# Altium footprint library SamacSys.PcbLib: 1008 footprints (part 33 of 63)
Each footprint in its own frame and in the unit in brackets; x right, y up, seen from the top. Pads: shape width x height; smd on the part's side, far side on the other; paste and mask are expansions set on the pad; w line width, h text height; cw(c..) or ccw(c..) is an arc to the next point about the centre after c.
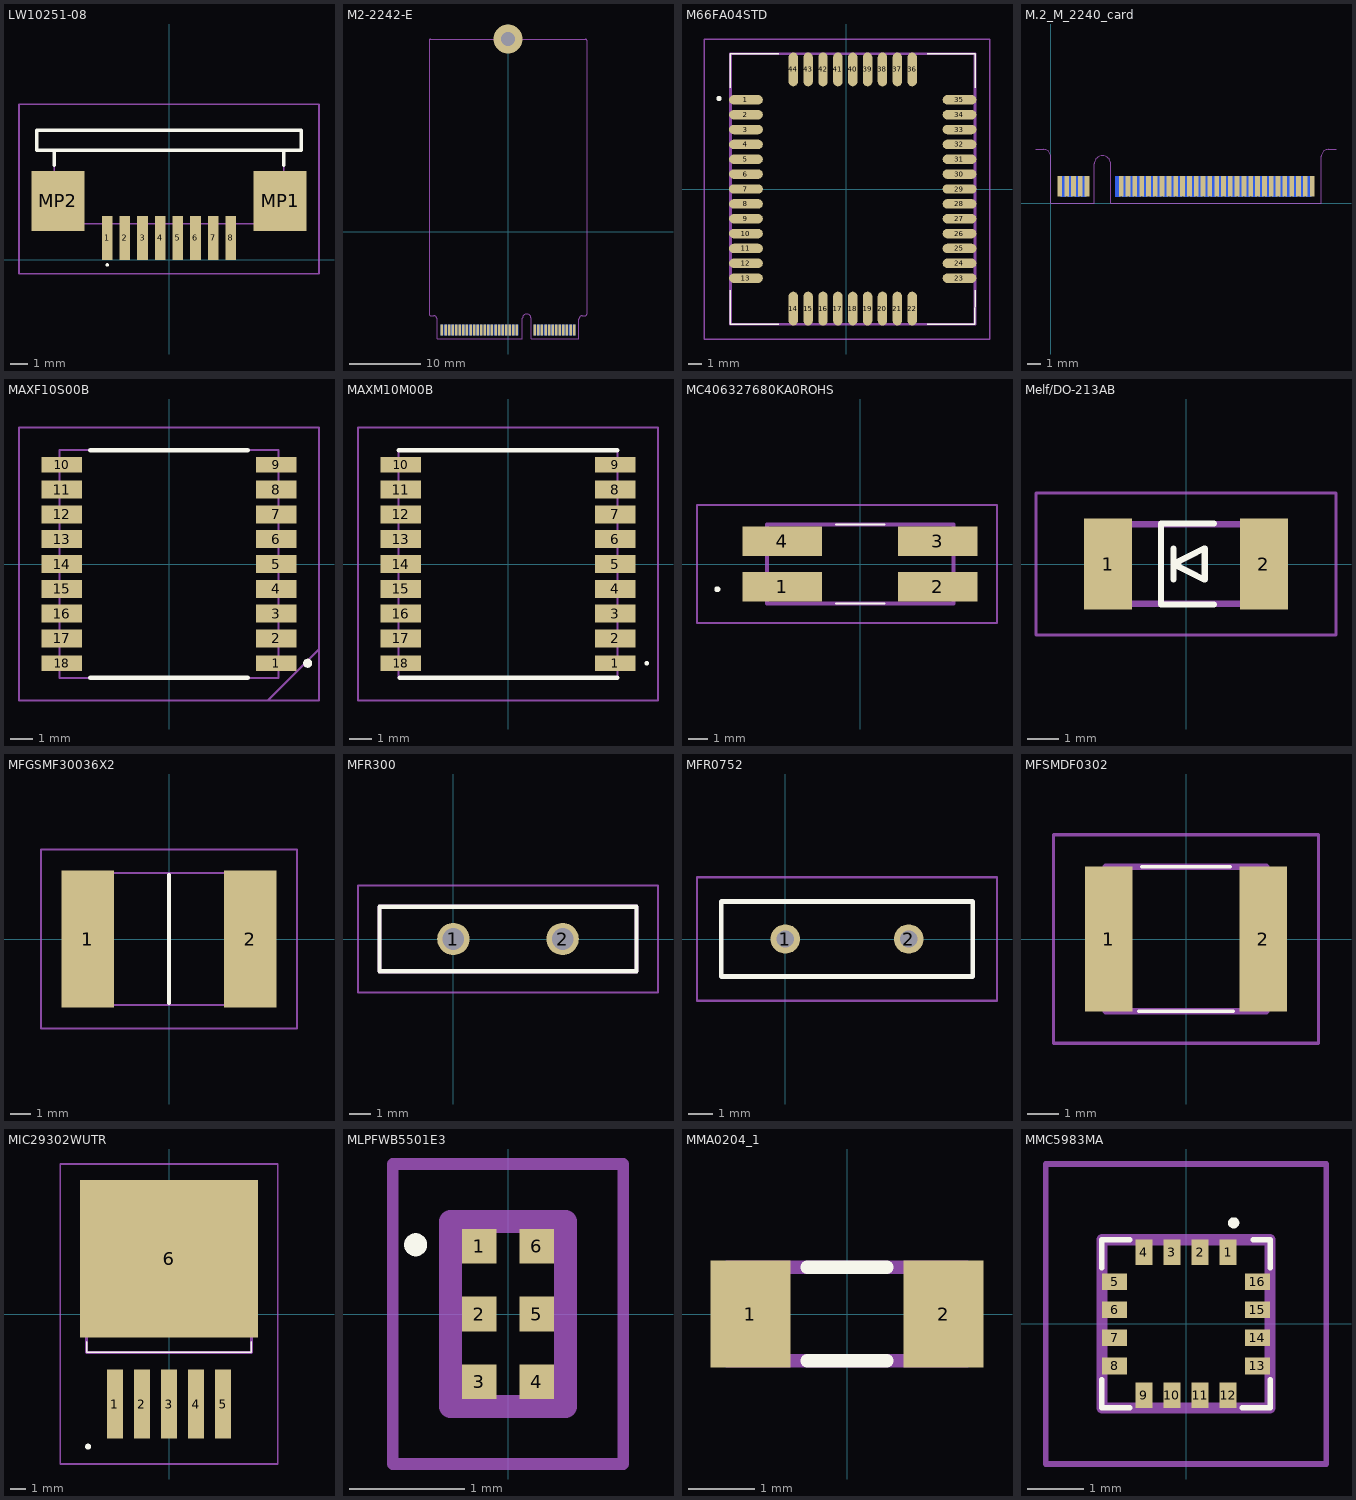
[diagram p32: the footprints below, top view; thin cyan lines are the x and y axes]

## LW10251-08 [mm] "FFC 1mm 8pin"
pads (10):
  rect 0.6x2.5 smd: 1(-3.5,1.25) 2(-2.5,1.25) 3(-1.5,1.25) 4(-0.5,1.25) 5(0.5,1.25) 6(1.5,1.25) 7(2.5,1.25) 8(3.5,1.25)
  rect 3x3.4 smd: MP1(6.3,3.35) MP2(-6.3,3.35)
Top Overlay:
  lines w0.1: -3.5,-0.328 ccw(c-3.5,-0.278) -3.5,-0.228 ccw(c-3.5,-0.278) -3.5,-0.328
  lines w0.2: -7.5,7.322 -7.5,6.222 -6.5,6.222 ; -7.5,7.35 3.5,7.35 ; -6.5,5.362 -6.5,6.222 ; -3.5,7.35 7.5,7.35 ; -2.5,6.222 6.5,6.222 ; 2.5,6.222 -6.5,6.222 ; 6.5,5.362 6.5,6.222 ; 7.5,7.322 7.5,6.222 6.5,6.222
Assembly:
  lines w0.1: -6.5,6.222 -6.5,2.05 2.5,2.05 ; -3.5,6.222 7.5,6.222 7.5,7.322 -3.5,7.322 ; -2.5,2.05 6.5,2.05 6.5,6.222 ; 3.5,6.222 -7.5,6.222 -7.5,7.322 3.5,7.322
Countryard:
  lines w0.1: -4.5,-0.778 8.5,-0.778 8.5,8.822 -4.5,8.822 ; 4.5,-0.778 -8.5,-0.778 -8.5,8.822 4.5,8.822
3D body "68610414422.stp": height 3.01, standoff 0, extent -7.5,0.472 3.5,7.572
3D body "68610414422.stp": height 3.01, standoff 0, extent -3.5,0.472 7.5,7.572

## M2-2242-E [mm] "UNTESTED"
pads (71):
  rect 0.35x1.5 smd: 1(9.25,-13.75) 3(8.75,-13.75) 5(8.25,-13.75) 7(7.75,-13.75) 9(7.25,-13.75) 11(6.75,-13.75) 13(6.25,-13.75) 15(5.75,-13.75) 17(5.25,-13.75) 19(4.75,-13.75) 21(4.25,-13.75) 23(3.75,-13.75) 25(1.25,-13.75) 25(1.25,-13.75) 25(1.25,-13.75) 27(0.75,-13.75) 29(0.25,-13.75) 31(-0.25,-13.75) 33(-0.75,-13.75) 35(-1.25,-13.75) 37(-1.75,-13.75) 39(-2.25,-13.75) 41(-2.75,-13.75) 43(-3.25,-13.75) 45(-3.75,-13.75) 47(-4.25,-13.75) 49(-4.75,-13.75) 51(-5.25,-13.75) 53(-5.75,-13.75) 55(-6.25,-13.75) 57(-6.75,-13.75) 59(-7.25,-13.75) 61(-7.75,-13.75) 63(-8.25,-13.75) 65(-8.75,-13.75) 67(-9.25,-13.75)
  rect 0.35x1.5 smd far side: 2(9.25,-13.75) 4(8.75,-13.75) 6(8.25,-13.75) 8(7.75,-13.75) 10(7.25,-13.75) 12(6.75,-13.75) 14(6.25,-13.75) 16(5.75,-13.75) 18(5.25,-13.75) 20(4.75,-13.75) 22(4.25,-13.75) 24(3.75,-13.75) 26(1.25,-13.75) 26(1.25,-13.75) 28(0.75,-13.75) 30(0.25,-13.75) 32(-0.25,-13.75) 34(-0.75,-13.75) 36(-1.25,-13.75) 38(-1.75,-13.75) 40(-2.25,-13.75) 42(-2.75,-13.75) 44(-3.25,-13.75) 46(-3.75,-13.75) 48(-4.25,-13.75) 50(-4.75,-13.75) 52(-5.25,-13.75) 54(-5.75,-13.75) 56(-6.25,-13.75) 58(-6.75,-13.75) 60(-7.25,-13.75) 62(-7.75,-13.75) 64(-8.25,-13.75) 66(-8.75,-13.75) 68(-9.25,-13.75)
via 0,27 diameter 4 hole 2
Top Solder:
  region: 2.025,-15 -9.925,-15 -9.925,-14.7 2.025,-14.7
  region: 9.925,-15 3.225,-15 3.225,-14.7 9.925,-14.7
Bottom Solder:
  region: 2.025,-15 -9.925,-15 -9.925,-14.7 2.025,-14.7
  region: 9.925,-15 3.225,-15 3.225,-14.7 9.925,-14.7
3D Body:
  lines w0.1: -11,-11.55 ccw(c-10.8,-11.55) -10.8,-11.75 -10.425,-11.75 cw(c-10.425,-12.25) -9.925,-12.25 -9.925,-15 2.025,-15 2.025,-12.1 cw(c2.625,-12.1) 3.225,-12.1 3.225,-15 9.925,-15 9.925,-12.25 cw(c10.425,-12.25) 10.425,-11.75 10.8,-11.75 ccw(c10.8,-11.55) 11,-11.55 11,26.8 ccw(c10.8,26.8) 10.8,27 0,27 -10.8,27 ccw(c-10.8,26.8) -11,26.8 -11,-11.55

## M66FA04STD [mm]
pads (44):
  rrect100% 2.5x0.7 smd: 1(-7.425,6.6) 2(-7.425,5.5) 3(-7.425,4.4) 4(-7.425,3.3) 5(-7.425,2.2) 6(-7.425,1.1) 7(-7.425,0) 8(-7.425,-1.1) 9(-7.425,-2.2) 10(-7.425,-3.3) 11(-7.425,-4.4) 12(-7.425,-5.5) 13(-7.425,-6.6) 23(8.375,-6.6) 24(8.375,-5.5) 25(8.375,-4.4) 26(8.375,-3.3) 27(8.375,-2.2) 28(8.375,-1.1) 29(8.375,0) 30(8.375,1.1) 31(8.375,2.2) 32(8.375,3.3) 33(8.375,4.4) 34(8.375,5.5) 35(8.375,6.6)
  rrect100% 0.7x2.5 smd: 14(-3.925,-8.85) 15(-2.825,-8.85) 16(-1.725,-8.85) 17(-0.625,-8.85) 18(0.475,-8.85) 19(1.575,-8.85) 20(2.675,-8.85) 21(3.775,-8.85) 22(4.875,-8.85) 36(4.875,8.85) 37(3.775,8.85) 38(2.675,8.85) 39(1.575,8.85) 40(0.475,8.85) 41(-0.625,8.85) 42(-1.725,8.85) 43(-2.825,8.85) 44(-3.925,8.85)
Top Overlay:
  lines w0.1: -8.575,-7.5 -8.575,-10 -5,-10 ; -8.575,7.5 -8.575,10 -5,10 ; 6,-10 9.5,-10 9.525,-7.5 ; 6,10 9.525,10 9.525,7.5
  lines w0.2: -9.425,6.6 cw(c-9.425,6.7) -9.425,6.8 cw(c-9.425,6.7) -9.425,6.6
Assembly:
  lines w0.2: -8.575,-10 9.525,-10 9.525,10 -8.575,10 -8.575,-10
Countryard:
  lines w0.1: -10.525,-11.1 10.625,-11.1 10.625,11.1 -10.525,11.1 -10.525,-11.1
3D body "M66FA-04-STD.stp": height 2.1, standoff 0.1, extent -8.575,-10 9.525,10

## M.2_M_2240_card [mm]
height 1.19
pads (67):
  rect 0.35x1.5 smd paste-1: 1(19.175,1.25) 3(18.675,1.25) 5(18.175,1.25) 7(17.675,1.25) 9(17.175,1.25) 11(16.675,1.25) 13(16.175,1.25) 15(15.675,1.25) 17(15.175,1.25) 19(14.675,1.25) 21(14.175,1.25) 23(13.675,1.25) 25(13.175,1.25) 27(12.675,1.25) 29(12.175,1.25) 31(11.675,1.25) 33(11.175,1.25) 35(10.675,1.25) 37(10.175,1.25) 39(9.675,1.25) 41(9.175,1.25) 43(8.675,1.25) 45(8.175,1.25) 47(7.675,1.25) 49(7.175,1.25) 51(6.675,1.25) 53(6.175,1.25) 55(5.675,1.25) 57(5.175,1.25) 67(2.675,1.25) 69(2.175,1.25) 71(1.675,1.25) 73(1.175,1.25) 75(0.675,1.25)
  rect 0.35x1.5 smd far side paste-1: 2(18.925,1.25) 4(18.425,1.25) 6(17.925,1.25) 8(17.425,1.25) 10(16.925,1.25) 12(16.425,1.25) 14(15.925,1.25) 16(15.425,1.25) 18(14.925,1.25) 20(14.425,1.25) 22(13.925,1.25) 24(13.425,1.25) 26(12.925,1.25) 28(12.425,1.25) 30(11.925,1.25) 32(11.425,1.25) 34(10.925,1.25) 36(10.425,1.25) 38(9.925,1.25) 40(9.425,1.25) 42(8.925,1.25) 44(8.425,1.25) 46(7.925,1.25) 48(7.425,1.25) 50(6.925,1.25) 52(6.425,1.25) 54(5.925,1.25) 56(5.425,1.25) 58(4.925,1.25) 68(2.425,1.25) 70(1.925,1.25) 72(1.425,1.25) 74(0.925,1.25)
Top Solder:
  region: 19.85,0 19.85,2.105 0,2.105 0,0
Bottom Solder:
  region: 19.85,0 19.85,2.105 0,2.105 0,0
Top 3D Body:
  lines w0.025: -1.075,3.95 -0.5,3.95 cw(c-0.5,3.45) 0,3.45 0,0 3.2,0 3.2,2.9 cw(c3.8,2.9) 3.8,3.5 cw(c3.8,2.9) 4.4,2.9 4.4,0 19.85,0 19.85,3.45 cw(c20.35,3.45) 20.35,3.95 20.925,3.95

## MAXF10S00B [mm]
pads (18):
  rect 1.8x0.7 smd: 1(4.75,-4.4) 9(4.75,4.4) 10(-4.75,4.4) 18(-4.75,-4.4)
  rect 1.8x0.8 smd: 2(4.75,-3.3) 3(4.75,-2.2) 4(4.75,-1.1) 5(4.75,0) 6(4.75,1.1) 7(4.75,2.2) 8(4.75,3.3) 11(-4.75,3.3) 12(-4.75,2.2) 13(-4.75,1.1) 14(-4.75,0) 15(-4.75,-1.1) 16(-4.75,-2.2) 17(-4.75,-3.3)
Top Overlay:
  lines w0.2: -3.5,-5.05 3.5,-5.05 ; -3.5,5.05 3.5,5.05 ; 6.05,-4.4 cw(c6.15,-4.4) 6.25,-4.4 cw(c6.15,-4.4) 6.05,-4.4
Top Courtyard:
  lines w0.05: 4.1,-6.05 4.375,-6.05
  lines w0.1: 4.375,-6.05 6.65,-3.775
Assembly:
  lines w0.1: -4.85,-5.05 4.85,-5.05 4.85,5.05 -4.85,5.05 -4.85,-5.05
Countryard:
  lines w0.1: -6.65,-6.05 6.65,-6.05 6.65,6.05 -6.65,6.05 -6.65,-6.05
3D body "MAX-F10S-00B.stp": height 2.48, standoff 0.01, extent -4.85,-5.35 4.85,5.05

## MAXM10M00B [mm]
pads (18):
  rect 1.8x0.7 smd: 1(4.75,-4.4) 9(4.75,4.4) 10(-4.75,4.4) 18(-4.75,-4.4)
  rect 1.8x0.8 smd: 2(4.75,-3.3) 3(4.75,-2.2) 4(4.75,-1.1) 5(4.75,0) 6(4.75,1.1) 7(4.75,2.2) 8(4.75,3.3) 11(-4.75,3.3) 12(-4.75,2.2) 13(-4.75,1.1) 14(-4.75,0) 15(-4.75,-1.1) 16(-4.75,-2.2) 17(-4.75,-3.3)
Top Overlay:
  lines w0.1: 6.1,-4.4 ccw(c6.15,-4.4) 6.2,-4.4 ; 6.1,-4.4 ccw(c6.15,-4.4) 6.2,-4.4 ; 6.1,-4.4 cw(c6.15,-4.4) 6.2,-4.4
  lines w0.2: -4.85,5.05 4.85,5.05 ; -4.8,-5.05 4.85,-5.05
Assembly:
  lines w0.1: -4.85,-5.05 -4.85,5.05 4.85,5.05 4.85,-5.05 -4.85,-5.05
Countryard:
  lines w0.1: -6.65,-6.05 -6.65,6.05 6.65,6.05 6.65,-6.05 -6.65,-6.05
3D body "MAX-M10M-00B.stp": height 2.5, standoff 0, extent -4.85,-5.05 4.85,5.05

## MC406327680KA0ROHS [mm]
pads (4):
  rect 4.1x1.52 smd: 1(-4,-1.16) 2(4,-1.16) 3(4,1.16) 4(-4,1.16)
Top Overlay:
  lines w0.1: -1.25,-2.03 1.25,-2.03 -1.25,-2.03 ; -1.25,2.03 1.25,2.03 -1.25,2.03
  lines w0.2: -7.4,-1.3 ccw(c-7.35,-1.3) -7.3,-1.3 ; -7.4,-1.3 cw(c-7.35,-1.3) -7.3,-1.3 ; -7.4,-1.3 ccw(c-7.35,-1.3) -7.3,-1.3
Assembly:
  lines w0.2: -4.8,-2.03 -4.8,2.03 4.8,2.03 4.8,-2.03 -4.8,-2.03
Countryard:
  lines w0.1: -8.4,-3.03 -8.4,3.03 7.05,3.03 7.05,-3.03 -8.4,-3.03
3D body "MC-406_32.7680K-A0_ROHS.stp": height 3.7, standoff 0, extent -5.898,-2.03 5.898,2.03

## Melf/DO-213AB [mm]
pads (2):
  rect 1.54x2.92 smd: 1(-2.5,0) 2(2.5,0)
Top Overlay:
  lines w0.2: -0.4,-0.5 -0.4,0.5 ; 0.9,-1.3 -0.8,-1.3 -0.8,1.3 0.9,1.3 ; -0.4,0 0.6,-0.5 0.6,0.5 -0.4,0
Assembly:
  lines w0.2: -2.5,-1.275 -2.5,1.275 2.5,1.275 2.5,-1.275 -2.5,-1.275
Countryard:
  lines w0.1: -4.81,-2.275 -4.81,2.275 4.81,2.275 4.81,-2.275 -4.81,-2.275
3D body "SM4007-W.stp": height 2.7, standoff 0, extent -2.5,-1.34 2.5,1.34

## MFGSMF30036X2 [mm]
pads (2):
  rect 2.5x6.6 smd: 1(-3.9,0) 2(3.9,0)
Top Overlay:
  lines w0.2: 0,-3.075 0,3.075
Assembly:
  lines w0.1: -4.325,-3.175 -4.325,3.175 4.325,3.175 4.325,-3.175 -4.325,-3.175
Countryard:
  lines w0.1: -6.15,-4.3 -6.15,4.3 6.15,4.3 6.15,-4.3 -6.15,-4.3
3D body "MF-GSMF300_36X-2.stp": height 1.68, standoff 0, extent -4.5,-3.35 4.5,3.35

## MFR300 [mm]
pads (2):
  round 1.515 hole 1.01: 1(0,0) 2(5.1,0)
Top Overlay:
  lines w0.2: -3.45,-1.5 8.55,-1.5 8.55,1.5 -3.45,1.5 -3.45,-1.5
Assembly:
  lines w0.2: -3.45,-1.5 8.55,-1.5 8.55,1.5 -3.45,1.5 -3.45,-1.5
Countryard:
  lines w0.1: -4.45,-2.5 9.55,-2.5 9.55,2.5 -4.45,2.5 -4.45,-2.5
3D body "MF-R300.stp": height 18.4, standoff -5, extent -3.45,-1.5 8.55,1.5

## MFR0752 [mm]
pads (2):
  round 1.217 hole 0.71: 1(0,0) 2(5.1,0)
Top Overlay:
  lines w0.2: -2.65,-1.55 -2.65,1.55 7.75,1.55 7.75,-1.55 -2.65,-1.55
Assembly:
  lines w0.1: -2.65,-1.55 -2.65,1.55 7.75,1.55 7.75,-1.55 -2.65,-1.55
Countryard:
  lines w0.1: -3.65,-2.55 -3.65,2.55 8.75,2.55 8.75,-2.55 -3.65,-2.55
3D body "MF-R075.stp": height 15.45, standoff -8.65, extent -3.256,-1.55 8.364,1.55

## MFSMDF0302 [mm]
pads (2):
  rect 1.5x4.6 smd: 1(-2.45,0) 2(2.45,0)
Top Overlay:
  lines w0.1: -1.5,-2.288 1.5,-2.288 ; -1.4,2.287 1.4,2.287
Assembly:
  lines w0.2: -2.54,-2.288 -2.54,2.287 2.54,2.287 2.54,-2.288 -2.54,-2.288
Countryard:
  lines w0.1: -4.2,-3.3 -4.2,3.3 4.2,3.3 4.2,-3.3 -4.2,-3.3
3D body "MF-SMDF030-2.stp": height 0.9, standoff 0, extent -2.275,-1.62 2.275,1.62

## MIC29302WUTR [mm]
pads (6):
  rect 1.02x4.318 smd: 1(-3.4,-5.664) 2(-1.7,-5.664) 3(0,-5.664) 4(1.7,-5.664) 5(3.4,-5.664)
  rect 11.176x9.906 smd: 6(0,3.482)
Top Overlay:
  lines w0.1: -5.181,-1.743 -5.181,-2.412 5.181,-2.412 5.181,-1.743
  lines w0.2: -5.001,-8.343 cw(c-5.091,-8.343) -5.181,-8.343 cw(c-5.09,-8.343) -4.999,-8.343
Assembly:
  lines w0.2: -5.181,-2.412 -5.181,6.757 5.181,6.757 5.181,-2.412 -5.181,-2.412
Countryard:
  lines w0.1: -6.842,-9.433 -6.842,9.433 6.842,9.433 6.842,-9.433 -6.842,-9.433
3D body "MIC29302WU-TR.stp": height 4.42, standoff 0, extent -5.029,-7.306 5.029,7.299

## MLPFWB5501E3 [mm]
pads (6):
  rect 0.3x0.3 smd: 1(-0.25,0.587) 2(-0.25,0) 3(-0.25,-0.587) 4(0.25,-0.587) 5(0.25,0) 6(0.25,0.587)
Top Overlay:
  lines w0.1: -0.8,0.55 ccw(c-0.8,0.6) -0.8,0.65 ccw(c-0.8,0.6) -0.8,0.55
Assembly:
  lines w0.2: -0.5,-0.8 -0.5,0.8 0.5,0.8 0.5,-0.8 -0.5,-0.8
Countryard:
  lines w0.1: -1,-1.3 -1,1.3 1,1.3 1,-1.3 -1,-1.3
3D body "MLPF-WB55-01E3.stp": height 0.45, standoff 0, extent -0.5,-0.8 0.5,0.8

## MMA0204_1 [mm]
pads (2):
  rect 1.2x1.6 smd: 1(-1.45,0) 2(1.45,0)
Top Overlay:
  lines w0.2: -0.6,-0.7 0.6,-0.7 ; -0.6,0.7 0.6,0.7
Assembly:
  lines w0.2: -1.8,-0.7 -1.8,0.7 1.8,0.7 1.8,-0.7 -1.8,-0.7
3D body "MMA02040C3321FB300.stp": height 1.4, standoff 0, extent -1.8,-0.698 1.8,0.7

## MMC5983MA [mm]
pads (16):
  rect 0.3x0.45 smd: 1(0.75,1.275) 2(0.25,1.275) 3(-0.25,1.275) 4(-0.75,1.275) 9(-0.75,-1.275) 10(-0.25,-1.275) 11(0.25,-1.275) 12(0.75,-1.275)
  rect 0.45x0.3 smd: 5(-1.275,0.75) 6(-1.275,0.25) 7(-1.275,-0.25) 8(-1.275,-0.75) 13(1.275,-0.75) 14(1.275,-0.25) 15(1.275,0.25) 16(1.275,0.75)
Top Overlay:
  lines w0.1: -1.5,-1 -1.5,-1.5 -1,-1.5 ; -1.5,1 -1.5,1.5 -1,1.5 ; 1,-1.5 1.5,-1.5 1.5,-1 ; 1.2,1.5 1.5,1.5 1.5,1 ; 0.8,1.8 ccw(c0.85,1.8) 0.9,1.8 ccw(c0.85,1.8) 0.8,1.8
Assembly:
  lines w0.2: -1.5,-1.5 1.5,-1.5 1.5,1.5 -1.5,1.5 -1.5,-1.5
Countryard:
  lines w0.1: -2.5,-2.5 2.5,-2.5 2.5,2.85 -2.5,2.85 -2.5,-2.5
3D body "MMC5983MA.stp": height 1, standoff 0, extent -1.5,-1.5 1.5,1.5